# Altium footprint library SD_Holder_THD2528-11SD-GF.PcbLib: 1 footprints
Each footprint in its own frame and in the unit in brackets; x right, y up, seen from the top. Pads: shape width x height; smd on the part's side, far side on the other; paste and mask are expansions set on the pad; w line width, h text height; cw(c..) or ccw(c..) is an arc to the next point about the centre after c.
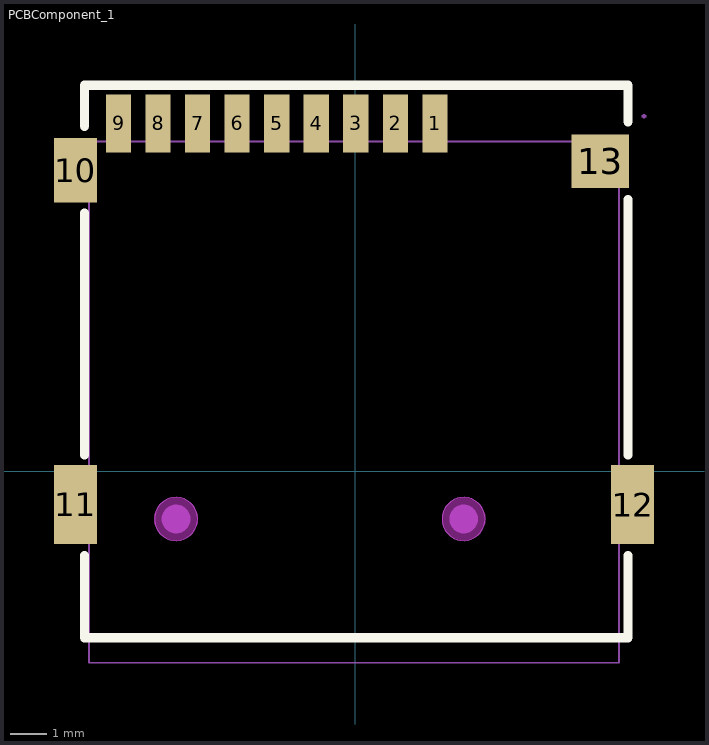
[diagram p0: the footprint, top view; thin cyan lines are the x and y axes]

## PCBComponent_1 [mm]
pads (13):
  rect 0.7x1.6 smd: 1(2.218,9.667) 2(1.118,9.667) 3(0.018,9.667) 4(-1.082,9.667) 5(-2.182,9.667) 6(-3.282,9.667) 7(-4.382,9.667) 8(-5.482,9.667) 9(-6.582,9.667)
  rect 1.2x1.8 smd: 10(-7.782,8.367)
  rect 1.2x2.2 smd: 11(-7.782,-0.933) 12(7.718,-0.933)
  rect 1.6x1.5 smd: 13(6.818,8.616)
Top Overlay:
  lines w0.254: -7.525,-2.349 -7.525,-4.635 7.588,-4.635 7.588,-2.349 ; -7.525,0.445 -7.525,7.175 ; -7.525,9.588 -7.525,10.731 7.588,10.731 7.588,9.716 ; 7.588,0.445 7.588,7.556
Keep-Out Layer:
  board cut-out: -4.382,-1.333 -4.382,-1.453 -4.473,-1.673 -4.642,-1.842 -4.863,-1.933 -5.101,-1.933 -5.322,-1.842 -5.491,-1.673 -5.582,-1.453 -5.582,-1.333 -5.582,-1.214 -5.491,-0.994 -5.322,-0.825 -5.101,-0.733 -4.863,-0.733 -4.642,-0.825 -4.473,-0.994 -4.382,-1.214 -4.382,-1.333
  board cut-out: 3.618,-1.333 3.618,-1.453 3.527,-1.673 3.358,-1.842 3.137,-1.933 2.899,-1.933 2.678,-1.842 2.509,-1.673 2.418,-1.453 2.418,-1.333 2.418,-1.214 2.509,-0.994 2.678,-0.825 2.899,-0.733 3.137,-0.733 3.358,-0.825 3.527,-0.994 3.618,-1.214 3.618,-1.333
Keep-Out Layer:
  circle w0.003: c-4.982,-1.333 r0.6
  circle w0.003: c3.018,-1.333 r0.6
  region: -4.382,-1.333 -4.391,-1.438 -4.418,-1.539 -4.462,-1.633 -4.522,-1.719 -4.596,-1.793 -4.682,-1.853 -4.777,-1.897 -4.878,-1.924 -4.982,-1.933 -5.086,-1.924 -5.187,-1.897 -5.282,-1.853 -5.368,-1.793 -5.442,-1.719 -5.502,-1.633 -5.546,-1.539 -5.573,-1.438 -5.582,-1.333 -5.573,-1.229 -5.546,-1.128 -5.502,-1.033 -5.442,-0.948 -5.368,-0.874 -5.282,-0.814 -5.187,-0.77 -5.086,-0.743 -4.982,-0.733 -4.878,-0.743 -4.777,-0.77 -4.682,-0.814 -4.596,-0.874 -4.522,-0.948 -4.462,-1.033 -4.418,-1.128 -4.391,-1.229
  region: -4.382,-1.333 -4.382,-1.453 -4.473,-1.673 -4.642,-1.842 -4.863,-1.933 -5.101,-1.933 -5.322,-1.842 -5.491,-1.673 -5.582,-1.453 -5.582,-1.333 -5.582,-1.214 -5.491,-0.994 -5.322,-0.825 -5.101,-0.733 -4.863,-0.733 -4.642,-0.825 -4.473,-0.994 -4.382,-1.214 -4.382,-1.333
  region: 3.618,-1.333 3.609,-1.438 3.582,-1.539 3.538,-1.633 3.478,-1.719 3.404,-1.793 3.318,-1.853 3.223,-1.897 3.122,-1.924 3.018,-1.933 2.914,-1.924 2.813,-1.897 2.718,-1.853 2.632,-1.793 2.558,-1.719 2.498,-1.633 2.454,-1.539 2.427,-1.438 2.418,-1.333 2.427,-1.229 2.454,-1.128 2.498,-1.033 2.558,-0.948 2.632,-0.874 2.718,-0.814 2.813,-0.77 2.914,-0.743 3.018,-0.733 3.122,-0.743 3.223,-0.77 3.318,-0.814 3.404,-0.874 3.478,-0.948 3.538,-1.033 3.582,-1.128 3.609,-1.229
  region: 3.618,-1.333 3.618,-1.453 3.527,-1.673 3.358,-1.842 3.137,-1.933 2.899,-1.933 2.678,-1.842 2.509,-1.673 2.418,-1.453 2.418,-1.333 2.418,-1.214 2.509,-0.994 2.678,-0.825 2.899,-0.733 3.137,-0.733 3.358,-0.825 3.527,-0.994 3.618,-1.214 3.618,-1.333
Mechanical 1:
  circle w0.003: c-4.982,-1.333 r0.6
  circle w0.003: c3.018,-1.333 r0.6
Mechanical 2:
  circle w0.4: c3.018,-1.333 r0.2
  circle w0.4: c-4.982,-1.333 r0.2
Mechanical 6:
  lines w0.051: -7.407,-5.334 7.343,-5.334 7.343,9.166 -7.407,9.166 -7.407,-5.334
Mechanical 8:
  region: 8.096,9.867 8.096,9.842 8.061,9.807 8.012,9.807 7.976,9.842 7.976,9.867 7.976,9.891 8.012,9.927 8.061,9.927 8.096,9.891 8.096,9.867
Mechanical 9:
  region: 7.236,-0.133 8.036,-0.133 8.036,-1.733 7.236,-1.733
  region: -8.101,-0.133 -7.301,-0.133 -7.301,-1.733 -8.101,-1.733
  region: 7.147,9.164 7.147,8.164 6.347,8.164 6.347,9.164
  region: -8.101,9.164 -7.301,9.164 -7.301,8.164 -8.101,8.164
  region: 2.068,9.867 2.368,9.867 2.368,9.152 2.068,9.152
  region: 0.968,9.867 1.268,9.867 1.268,9.152 0.968,9.152
  region: -1.232,9.867 -0.932,9.867 -0.932,9.152 -1.232,9.152
  region: -0.132,9.867 0.168,9.867 0.168,9.152 -0.132,9.152
  region: -2.332,9.867 -2.032,9.867 -2.032,9.152 -2.332,9.152
  region: -3.432,9.867 -3.132,9.867 -3.132,9.152 -3.432,9.152
  region: -4.532,9.867 -4.232,9.867 -4.232,9.152 -4.532,9.152
  region: -5.632,9.867 -5.332,9.867 -5.332,9.152 -5.632,9.152
  region: -6.732,9.867 -6.432,9.867 -6.432,9.152 -6.732,9.152